# EAGLE library part STM32WB55VGY6TR (library STM32WB55VGY6TR)
Ultra-low-power dual core Arm Cortex-M4 MCU 64 MHz, Cortex-M0+ 32MHz with 1 Mbyte of Flash memory, Bluetooth 5, 802.15.4, USB, LCD, AES-256 Source: Datasheet <https://www.st.com/resource/en/datasheet/stm32wb55cc.pdf>
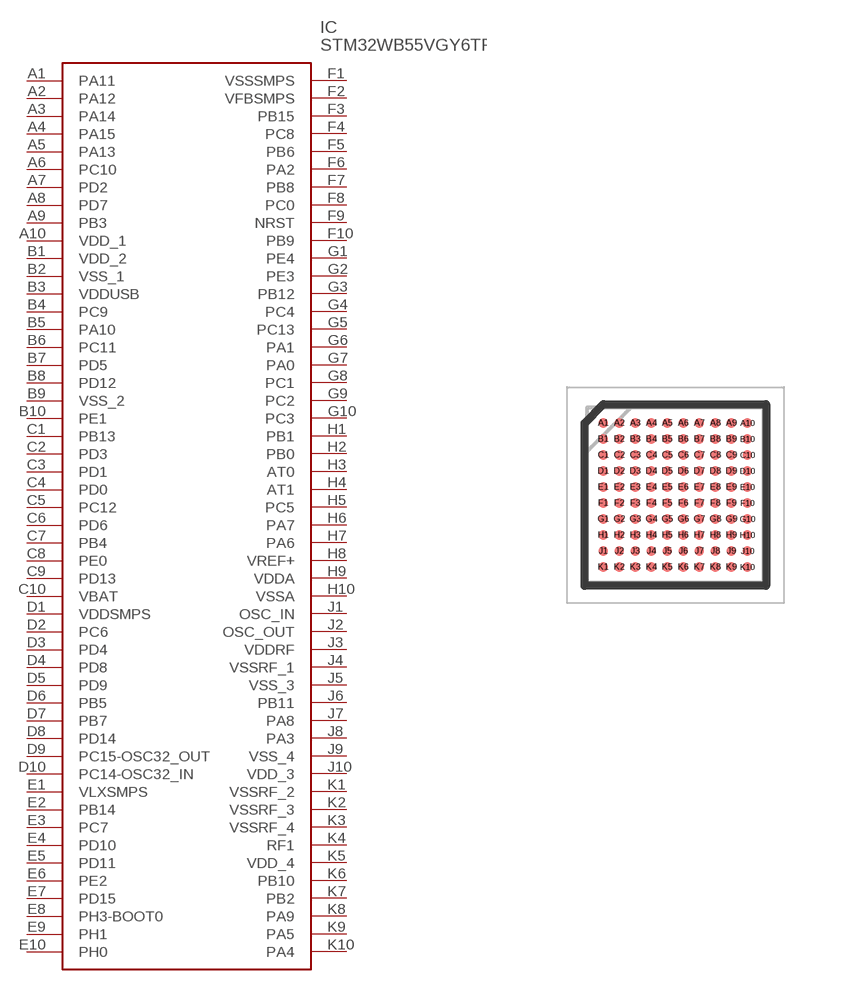
[diagram p0: symbol with the pads of BGA100C40P10X10_440X438X59; footprint BGA100C40P10X10_440X438X59]

Designator prefix IC

## STM32WB55VGY6TR (Description: Ultra-low-power dual core Arm Cortex-M4 MCU 64 MHz, Cortex-M0+ 32MHz with 1 Mbyte of Flash memory, Bluetooth 5, 802.15.4, USB, LCD, AES-256; Height: 0.59mm; Manufacturer_Name: STMicroelectronics; Manufacturer_Part_Number: STM32WB55VGY6TR; Mouser_Part_Number: 511-STM32WB55VGY6TR; Mouser_Price-Stock: https://www.mouser.co.uk/ProductDetail/STMicroelectronics/STM32WB55VGY6TR?qs=lYGu3FyN48e4iwYOkj%252BV4w%3D%3D)  [BGA100C40P10X10_440X438X59]
A1  PA11
A2  PA12
A3  PA14
A4  PA15
A5  PA13
A6  PC10
A7  PD2
A8  PD7
A9  PB3
A10  VDD_1
B1  VDD_2
B2  VSS_1
B3  VDDUSB
B4  PC9
B5  PA10
B6  PC11
B7  PD5
B8  PD12
B9  VSS_2
B10  PE1
C1  PB13
C2  PD3
C3  PD1
C4  PD0
C5  PC12
C6  PD6
C7  PB4
C8  PE0
C9  PD13
C10  VBAT
D1  VDDSMPS
D2  PC6
D3  PD4
D4  PD8
D5  PD9
D6  PB5
D7  PB7
D8  PD14
D9  PC15-OSC32_OUT
D10  PC14-OSC32_IN
E1  VLXSMPS
E2  PB14
E3  PC7
E4  PD10
E5  PD11
E6  PE2
E7  PD15
E8  PH3-BOOT0
E9  PH1
E10  PH0
F1  VSSSMPS
F2  VFBSMPS
F3  PB15
F4  PC8
F5  PB6
F6  PA2
F7  PB8
F8  PC0
F9  NRST
F10  PB9
G1  PE4
G2  PE3
G3  PB12
G4  PC4
G5  PC13
G6  PA1
G7  PA0
G8  PC1
G9  PC2
G10  PC3
H1  PB1
H2  PB0
H3  AT0
H4  AT1
H5  PC5
H6  PA7
H7  PA6
H8  VREF+
H9  VDDA
H10  VSSA
J1  OSC_IN
J2  OSC_OUT
J3  VDDRF
J4  VSSRF_1
J5  VSS_3
J6  PB11
J7  PA8
J8  PA3
J9  VSS_4
J10  VDD_3
K1  VSSRF_2
K2  VSSRF_3
K3  VSSRF_4
K4  RF1
K5  VDD_4
K6  PB10
K7  PB2
K8  PA9
K9  PA5
K10  PA4

## Footprint BGA100C40P10X10_440X438X59 (pad centres in mm)
WLCSP100 bga
smd 0.242 x 0.242: A1 -1.8,1.8; A2 -1.4,1.8; A3 -1,1.8; A4 -0.6,1.8; A5 -0.2,1.8; A6 0.2,1.8; A7 0.6,1.8; A8 1,1.8; A9 1.4,1.8; A10 1.8,1.8; B1 -1.8,1.4; B2 -1.4,1.4; B3 -1,1.4; B4 -0.6,1.4; B5 -0.2,1.4; B6 0.2,1.4; B7 0.6,1.4; B8 1,1.4; B9 1.4,1.4; B10 1.8,1.4; C1 -1.8,1; C2 -1.4,1; C3 -1,1; C4 -0.6,1; C5 -0.2,1; C6 0.2,1; C7 0.6,1; C8 1,1; C9 1.4,1; C10 1.8,1; D1 -1.8,0.6; D2 -1.4,0.6; D3 -1,0.6; D4 -0.6,0.6; D5 -0.2,0.6; D6 0.2,0.6; D7 0.6,0.6; D8 1,0.6; D9 1.4,0.6; D10 1.8,0.6; E1 -1.8,0.2; E2 -1.4,0.2; E3 -1,0.2; E4 -0.6,0.2; E5 -0.2,0.2; E6 0.2,0.2; E7 0.6,0.2; E8 1,0.2; E9 1.4,0.2; E10 1.8,0.2; F1 -1.8,-0.2; F2 -1.4,-0.2; F3 -1,-0.2; F4 -0.6,-0.2; F5 -0.2,-0.2; F6 0.2,-0.2; F7 0.6,-0.2; F8 1,-0.2; F9 1.4,-0.2; F10 1.8,-0.2; G1 -1.8,-0.6; G2 -1.4,-0.6; G3 -1,-0.6; G4 -0.6,-0.6; G5 -0.2,-0.6; G6 0.2,-0.6; G7 0.6,-0.6; G8 1,-0.6; G9 1.4,-0.6; G10 1.8,-0.6; H1 -1.8,-1; H2 -1.4,-1; H3 -1,-1; H4 -0.6,-1; H5 -0.2,-1; H6 0.2,-1; H7 0.6,-1; H8 1,-1; H9 1.4,-1; H10 1.8,-1; J1 -1.8,-1.4; J2 -1.4,-1.4; J3 -1,-1.4; J4 -0.6,-1.4; J5 -0.2,-1.4; J6 0.2,-1.4; J7 0.6,-1.4; J8 1,-1.4; J9 1.4,-1.4; J10 1.8,-1.4; K1 -1.8,-1.8; K2 -1.4,-1.8; K3 -1,-1.8; K4 -0.6,-1.8; K5 -0.2,-1.8; K6 0.2,-1.8; K7 0.6,-1.8; K8 1,-1.8; K9 1.4,-1.8; K10 1.8,-1.8